# Altium footprint library Robot.PcbLib: 113 footprints (part 7 of 8)
Each footprint in its own frame and in the unit in brackets; x right, y up, seen from the top. Pads: shape width x height; smd on the part's side, far side on the other; paste and mask are expansions set on the pad; w line width, h text height; cw(c..) or ccw(c..) is an arc to the next point about the centre after c.
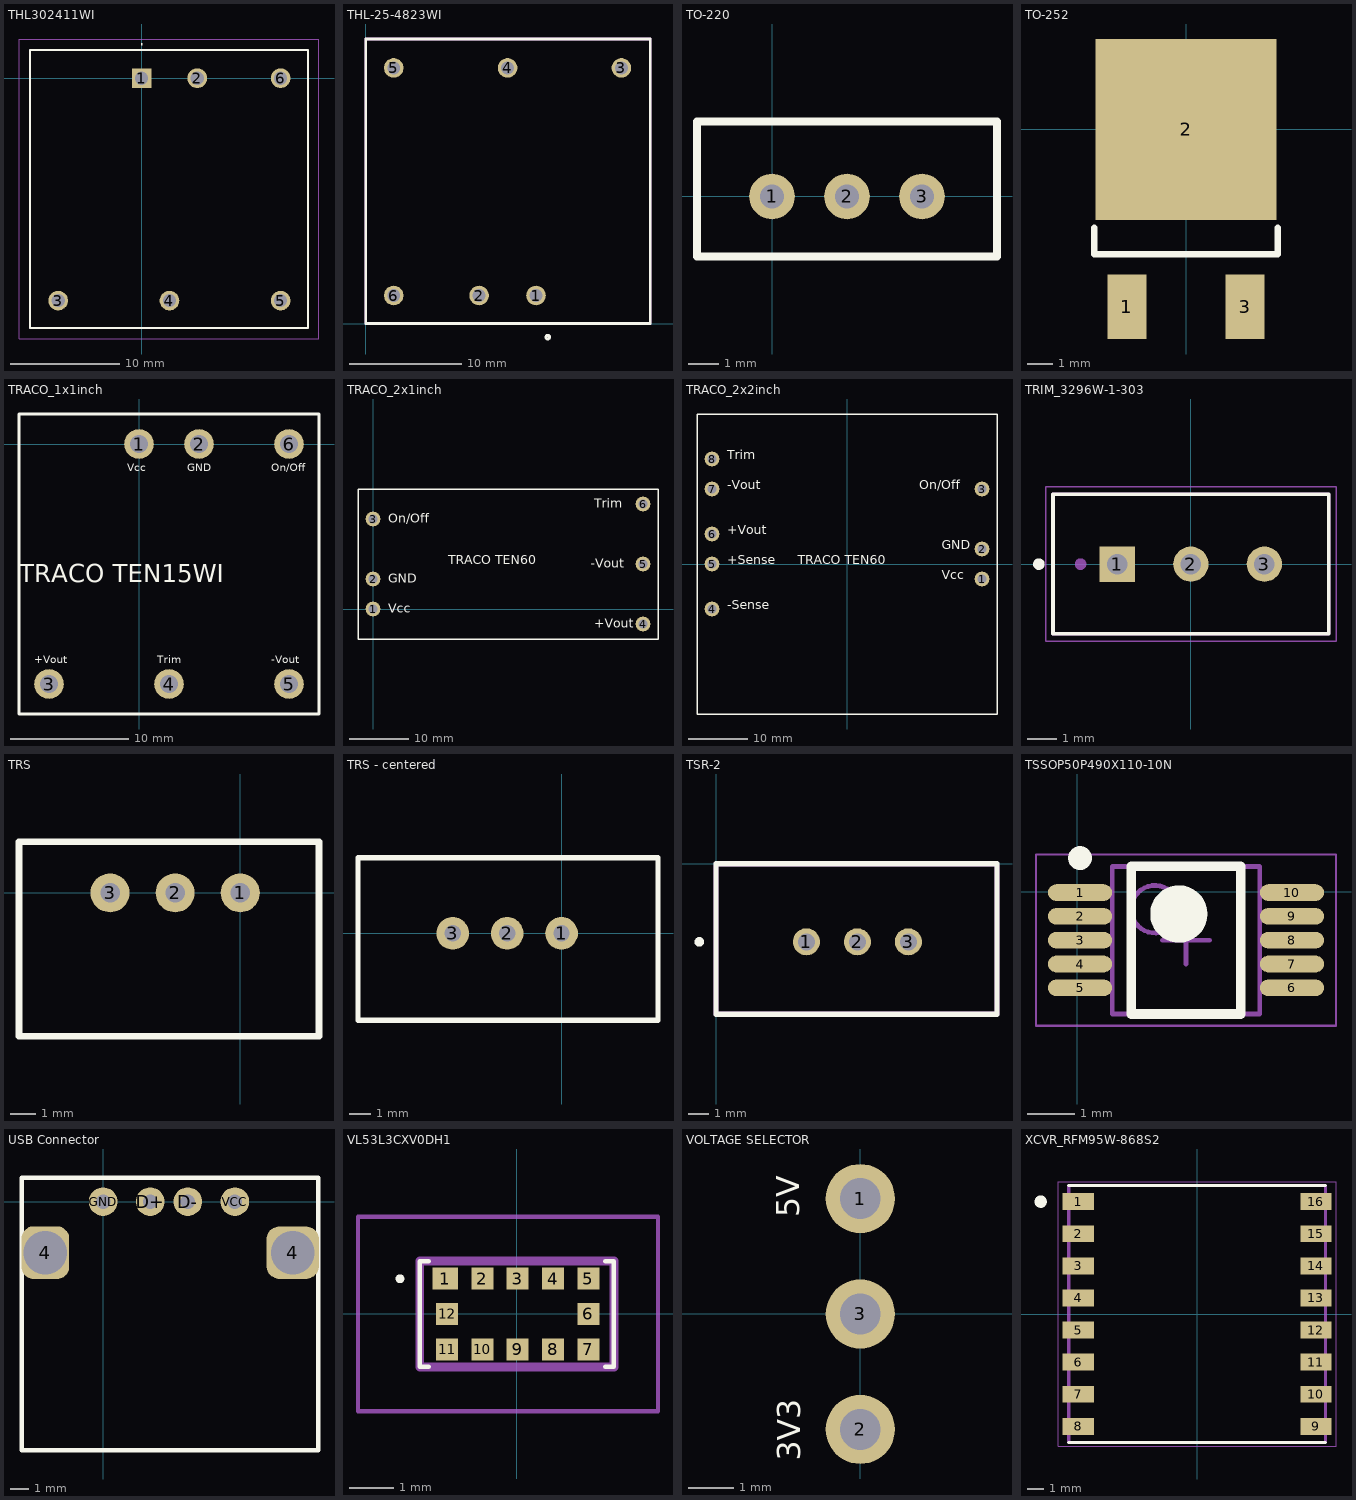
[diagram p6: the footprints below, top view; thin cyan lines are the x and y axes]

## THL302411WI [mm]
pads (6):
  rect 1.8x1.8 hole 1.2: 1(0,0)
  round 1.8 hole 1.2: 2(5.08,0) 3(-7.62,-20.32) 4(2.54,-20.32) 5(12.7,-20.32) 6(12.7,0)
Top Overlay:
  lines w0.1: 0,3.05 cw(c0,3.1) 0,3.15 cw(c0,3.1) 0,3.05
  lines w0.2: -10.2,-22.82 -10.2,2.58 15.2,2.58 15.2,-22.82 -10.2,-22.82
Mechanical 13:
  lines w0.1: -10.2,-22.82 -10.2,2.58 15.2,2.58 15.2,-22.82 -10.2,-22.82
Mechanical 15:
  lines w0.1: -11.2,-23.82 -11.2,3.58 16.2,3.58 16.2,-23.82 -11.2,-23.82
3D body "THL_30-2411WI.stp": height 10.1, standoff -6.1, extent -10.2,-22.82 15.2,2.58

## THL-25-4823WI [mm]
pads (6):
  round 1.75 hole 1.15: 1(15.2,2.5) 2(10.12,2.5) 3(22.82,22.82) 4(12.66,22.82) 5(2.5,22.82) 6(2.5,2.5)
Top Overlay:
  circle w0.254: c16.253,-1.215 r0.166
  lines w0.254: 0,0 25.4,0 25.4,25.4 0,25.4 0,0
Mechanical 13:
  lines w0.254: 0,0 0,25.4 25.4,25.4 25.4,0 0,0
3D body "THL_25-2411.stp": height 10.1, standoff -6.06, extent 0,-0.05 25.4,25.35

## TO-220 [mil]
pads (3):
  round 60 hole 31.5: 1(0,0) 2(98.43,0) 3(196.85,0)
Top Overlay:
  lines w10: -98.43,-78.74 -98.43,98.43 295.28,98.43 295.28,-78.74 -98.43,-78.74

## TO-252 [mm] "TO-252 standard package"
pads (3):
  rect 1.5x2.5 smd: 1(-2.286,-6.858) 3(2.286,-6.858)
  rect 7x7 smd: 2(0,0)
Top Overlay:
  lines w0.254: -3.556,-3.81 -3.556,-4.826 3.556,-4.826 3.556,-3.81
3D body "TO252.STEP": height 2.41, standoff 0.01, extent -3.25,-7.112 3.25,1.988

## TRACO_1x1inch [mm] "Convertisseur de tension"
pads (6):
  round 2.5 hole 1.5: 1(0,0) 2(5.08,0) 3(-7.62,-20.32) 4(2.54,-20.32) 5(12.7,-20.32) 6(12.7,0)
Top Overlay:
  lines w0.254: -10.16,-22.86 -10.16,2.54 15.24,2.54 15.24,-22.86 -10.16,-22.86
  text "TRACO TEN15WI" at -10.16,-11.684 h1.52
  text "+Vout" at -8.89,-18.542 h0.64
  text "Trim" at 1.524,-18.542 h0.64
  text "-Vout" at 11.176,-18.542 h0.64
  text "Vcc" at -1.016,-2.286 h0.64
  text "GND" at 4.064,-2.286 h0.64
  text "On/Off" at 11.176,-2.286 h0.64
3D body "Traco_1x1inch.stp": height 10.11, standoff -5.59, extent -10.16,-22.86 15.24,2.54

## TRACO_2x1inch [mm] "Convertisseur de tension"
pads (6):
  round 2.5 hole 1.5: 1(0,0) 2(0,5.08) 3(0,15.24) 4(45.72,-2.54) 5(45.72,7.62) 6(45.72,17.78)
Top Overlay:
  lines w0.254: -2.54,-5.08 48.26,-5.08 48.26,20.32 -2.54,20.32 -2.54,-5.08
  text "TRACO TEN60" at 12.7,7.62 h1.52
  text "Vcc" at 2.54,-0.635 h1.52
  text "GND" at 2.54,4.445 h1.52
  text "On/Off" at 2.54,14.605 h1.52
  text "+Vout" at 37.465,-3.175 h1.52
  text "-Vout" at 36.83,6.985 h1.52
  text "Trim" at 37.465,17.145 h1.52
3D body "Traco_2x1Inch.stp": height 10.21, standoff -5.59, extent -2.54,-5.08 48.26,20.32

## TRACO_2x2inch [mm] "Convertisseur de tension"
pads (8):
  round 2.5 hole 1.5: 1(22.86,-2.54) 2(22.86,2.54) 3(22.86,12.7) 4(-22.86,-7.62) 5(-22.86,0) 6(-22.86,5.08) 7(-22.86,12.7) 8(-22.86,17.78)
Top Overlay:
  lines w0.254: -25.4,-25.4 -25.4,25.4 25.4,25.4 25.4,-25.4 -25.4,-25.4
  text "TRACO TEN60" at -8.382,0 h1.52
  text "Trim" at -20.32,17.78 h1.52
  text "-Vout" at -20.32,12.7 h1.52
  text "+Vout" at -20.32,5.08 h1.52
  text "+Sense" at -20.32,0 h1.52
  text "-Sense" at -20.32,-7.62 h1.52
  text "Vcc" at 16.002,-2.54 h1.52
  text "GND" at 16.002,2.54 h1.52
  text "On/Off" at 12.192,12.7 h1.52

## TRIM_3296W-1-303 [mm]
pads (3):
  rect 1.218x1.218 / inner round 1.218 / far side rect 1.218x1.218 hole 0.71 mask+0.102: 1(-2.54,0)
  round 1.218 hole 0.71 mask+0.102: 2(0,0) 3(2.54,0)
Top Overlay:
  circle w0.2: c-5.25,0 r0.1
  lines w0.127: -4.765,-2.41 4.765,-2.41 4.765,2.42 -4.765,2.42 -4.765,-2.41
Mechanical 13:
  circle w0.2: c-3.81,0 r0.1
  lines w0.127: -4.765,-2.41 -4.765,2.42 4.765,2.42 4.765,-2.41 -4.765,-2.41
Mechanical 15:
  lines w0.05: -5.015,-2.66 -5.015,2.67 5.015,2.67 5.015,-2.66 -5.015,-2.66
3D body "step_temp.STEP": height 11.55, standoff -7.72, extent -4.765,-2.41 4.765,2.42

## TRS [mil]
height 401.57
pads (3):
  round 60 hole 30: 1(0,0) 2(-100,0) 3(-200,0)
Top Overlay:
  lines w10: -339.76,-220.47 -339.76,78.74 120.87,78.74 120.87,-220.47 -339.76,-220.47
3D body "TSR 1-2450.stp": height 398.14, standoff -160.91, extent -340.63,-217.64 120,79.61

## TRS - centered [mil]
height 401.57
pads (3):
  round 60 hole 30: 1(0,0) 2(-100,0) 3(-200,0)
Top Overlay:
  lines w10: -374.02,-160 -374.02,139.21 177.17,139.21 177.17,-160 -374.02,-160
3D body: height 397.64, standoff 0, extent -374.02,-157.48 177.17,137.8

## TSR-2 [mm]
pads (3):
  round 1.35 hole 0.85: 1(4.5,-3.89) 2(7.04,-3.89) 3(9.58,-3.89)
Top Overlay:
  circle w0.254: c-0.842,-3.896 r0.113
  lines w0.254: 0,-7.5 14,-7.5 14,0 0,0 0,-7.5
Mechanical 13:
  lines w0.254: 0,-7.5 0,0 14,0 14,-7.5 0,-7.5
3D body "TSR_2-24120.stp": height 10, standoff -4.2, extent 0.04,-7.5 14.04,0

## TSSOP50P490X110-10N [mm] "TSSOP, 10-Leads, Body 3,00x3,00mm, Pitch 0,50mm, IPC Medium Density"
height 1.1
pads (10):
  oval 1.35x0.35 smd: 1(0.061,-0.016) 2(0.061,-0.516) 3(0.061,-1.016) 4(0.061,-1.516) 5(0.061,-2.016) 6(4.511,-2.016) 7(4.511,-1.516) 8(4.511,-1.016) 9(4.511,-0.516) 10(4.511,-0.016)
Top Overlay:
  circle w0.25: c0.061,0.709 r0.125
  circle w0.6: c2.136,-0.466 r0.3
  lines w0.2: 1.136,-2.566 1.136,0.534 3.436,0.534 3.436,-2.566 1.136,-2.566
Mechanical 13:
  circle w0.1: c1.636,-0.366 r0.5
  lines w0.1: 0.736,-2.566 0.736,0.534 3.836,0.534 3.836,-2.566 0.736,-2.566
Mechanical 15:
  lines w0.05: -0.864,-2.816 -0.864,0.784 5.436,0.784 5.436,-2.816 -0.864,-2.816
  lines w0.1: 1.786,-1.016 2.786,-1.016 ; 2.286,-1.516 2.286,-0.516
3D body: height 1.1, standoff 0.15, extent 0.736,-2.566 3.836,0.534

## USB Connector [mil] "87520-0010BLF"
pads (6):
  rrect50% 100x110 hole 90.55: 4(-120.87,-106.69)
  rrect50% 110x110 hole 90.55: 4(396.46,-106.69)
  round 60 hole 30: D+(98.43,0) D-(177.17,0) GND(0,0) VCC(275.59,0)
Top Overlay:
  lines w10: -170,-520 -170,50 450,50 450,-520 -170,-520
3D body "femaleThruHoleUSB.stp": height 292.82, standoff -145.56, extent -172.64,-519.49 448.23,49.21

## VL53L3CXV0DH1 [mm]
pads (12):
  rect 0.58x0.5 smd: 1(-1.62,0.8)
  rect 0.5x0.5 smd: 2(-0.78,0.8) 3(0.02,0.8) 4(0.82,0.8) 5(1.62,0.8) 6(1.62,0) 7(1.62,-0.8) 8(0.82,-0.8) 9(0.02,-0.8) 10(-0.78,-0.8) 11(-1.58,-0.8) 12(-1.58,0)
Top Overlay:
  lines w0.1: -2,-1.2 -2.2,-1.2 -2.2,1.2 -2,1.2 ; 2,-1.2 2.2,-1.2 2.2,1.2 2,1.2 ; -2.7,0.8 ccw(c-2.65,0.8) -2.6,0.8 ccw(c-2.65,0.8) -2.7,0.8
Mechanical 13:
  lines w0.2: -2.2,-1.2 -2.2,1.2 2.2,1.2 2.2,-1.2 -2.2,-1.2
Mechanical 15:
  lines w0.1: -3.6,-2.2 -3.6,2.2 3.2,2.2 3.2,-2.2 -3.6,-2.2
3D body "VL53L3CXV0DH_1.stp": height 1.05, standoff 0, extent -2.2,-1.2 2.2,1.2

## VOLTAGE SELECTOR [mil] "3 Pads for Voltage Selection"
pads (3):
  round 60 hole 35.43: 1(0,100) 2(0,-100) 3(0,0)
Top Overlay:
  text "3V3" at -52,-127 h20
  text "5V" at -53,84 h20
3D body "Pin Header 1x1 TH 2.54mm Pitch.stp": height 340.5, standoff -109.5, extent -50,-150 50,-50
3D body "Pin Header 1x1 TH 2.54mm Pitch.stp": height 340.5, standoff -109.5, extent -50,-50 50,50
3D body "Pin Header 1x1 TH 2.54mm Pitch.stp": height 340.5, standoff -109.5, extent -50,50 50,150

## XCVR_RFM95W-868S2 [mm] "LoRa Transceiver Module 868MHz Antenna Not Included Surface Mount"
pads (16):
  rect 1.95x1.05 smd: 1(-7.4,7) 2(-7.4,5) 3(-7.4,3) 4(-7.4,1) 5(-7.4,-1) 6(-7.4,-3) 7(-7.4,-5) 8(-7.4,-7) 9(7.4,-7) 10(7.4,-5) 11(7.4,-3) 12(7.4,-1) 13(7.4,1) 14(7.4,3) 15(7.4,5) 16(7.4,7)
Top Overlay:
  circle w0.2: c-9.75,7 r0.292
  region: -9.5,6.808 -10.011,6.808 -10.011,7.2 -9.5,7.2
  lines w0.2: -8,-8 8,-8 ; -8,8 8,8
Mechanical 13:
  lines w0.2: -8,-8 -8,8 ; 8,-8 8,8
Mechanical 15:
  lines w0.05: -8.65,-8.25 -8.65,8.25 8.65,8.25 8.65,-8.25 -8.65,-8.25
3D body "step_temp.STEP": height 1.8, standoff 0, extent -8,-8 8,8